# Altium footprint library PCB1.PcbLib: 34 footprints (part 2 of 3)
Each footprint in its own frame and in the unit in brackets; x right, y up, seen from the top. Pads: shape width x height; smd on the part's side, far side on the other; paste and mask are expansions set on the pad; w line width, h text height; cw(c..) or ccw(c..) is an arc to the next point about the centre after c.
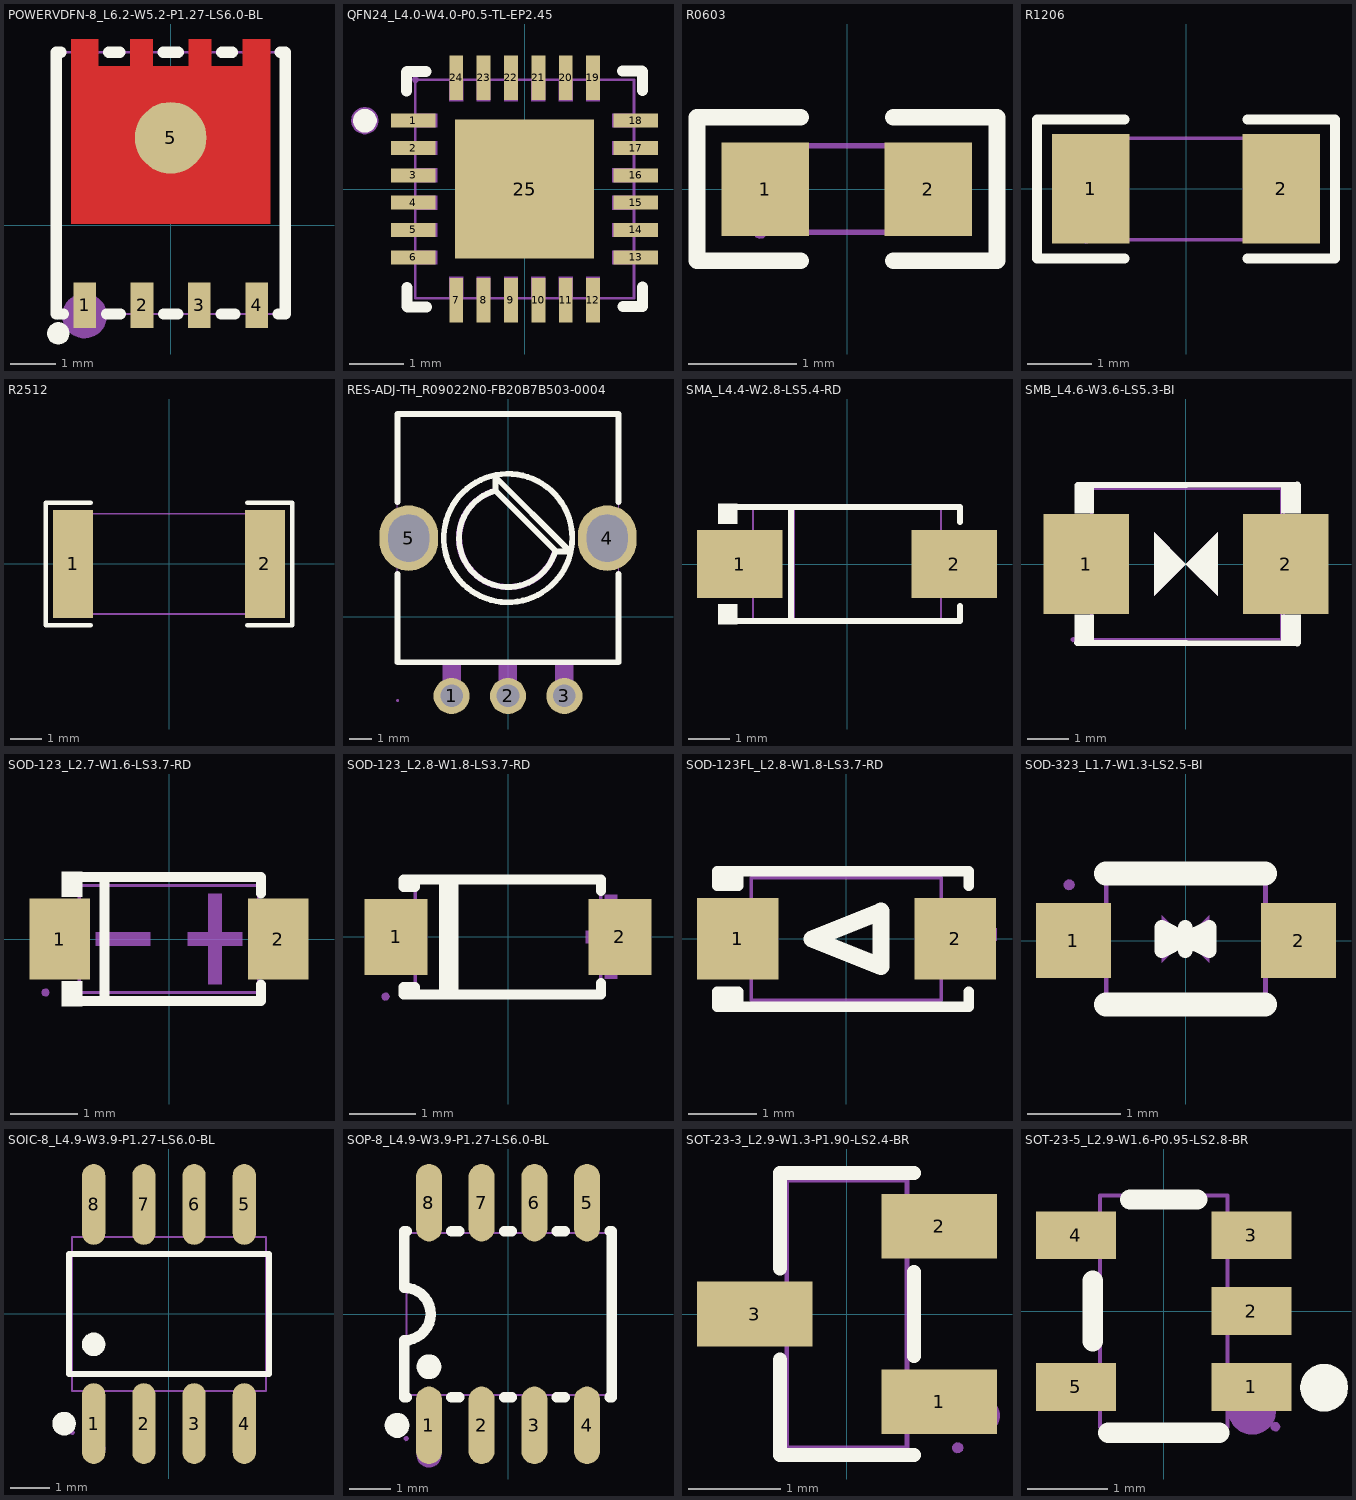
[diagram p1: the footprints below, top view; thin cyan lines are the x and y axes]

## POWERVDFN-8_L6.2-W5.2-P1.27-LS6.0-BL [mil]
pads (5):
  rect 19.7x39.4 smd paste-3937 mask+2: 1(-75,-69.9) 2(-25,-69.9) 3(25,-69.9) 4(75,-69.9)
  round 62.5 smd: 5(0,76.2)
Top Layer:
  region: -86.6,1 -86.6,162.4 -63,162.4 -63,138.8 -35.4,138.8 -35.4,162.4 -15.7,162.4 -15.7,138.8 15.8,138.8 15.8,162.4 35.5,162.4 35.5,138.8 63,138.8 63,162.4 86.7,162.4 86.7,1
Top Overlay:
  lines w9.8: -102.9,-94.5 -102.5,-92.6 -101.5,-91 -99.9,-90 -98,-89.6 -96.1,-90 -94.5,-91 -93.4,-92.6 -93.1,-94.5 -93.4,-96.4 -94.5,-98 -96.1,-99 -98,-99.4 -99.9,-99 -101.5,-98 -102.5,-96.4 -102.9,-94.5
  lines w10: -95.7,150.8 -100,150.8 -100,136.4 -100,-63.6 -100,-77.6 -93.9,-77.6 ; -56,-77.6 -43.9,-77.6 ; -53.9,150.8 -44.5,150.8 ; -6.6,150.8 6.7,150.8 ; -6,-77.6 6.1,-77.6 ; 44,-77.6 56.1,-77.6 ; 44.6,150.8 53.9,150.8 ; 94,-77.6 100,-77.6 100,-63.6 100,136.4 100,150.8 95.8,150.8
Top Paste:
  region: 86.7,162.4 63,162.4 63,138.8 35.5,138.8 35.5,162.4 15.8,162.4 15.8,138.8 -15.7,138.8 -15.7,162.4 -35.4,162.4 -35.4,138.8 -63,138.8 -63,162.4 -86.6,162.4 -86.6,1 86.7,1 86.7,1.4
  region: -84.8,-89.6 -84.8,-50.2 -65.1,-50.2 -65.1,-89.6
  region: -34.8,-89.6 -34.8,-50.2 -15.1,-50.2 -15.1,-89.6
  region: 15.2,-89.6 15.2,-50.2 34.9,-50.2 34.9,-89.6
  region: 65.2,-89.6 65.2,-50.2 84.9,-50.2 84.9,-89.6
Mechanical 6:
  lines w19.7: -84.9,-80.5 -84.9,-77.8 -84.2,-75.2 -82.8,-72.9 -80.8,-71.1 -78.5,-69.9 -75.8,-69.3 -73.2,-69.5 -70.6,-70.4 -68.4,-72 -66.8,-74 -65.7,-76.5 -65.3,-79.1 -65.7,-81.8 -66.8,-84.3 -68.4,-86.3 -70.6,-87.9 -73.2,-88.8 -75.8,-89 -78.5,-88.4 -80.8,-87.2 -82.8,-85.4 -84.2,-83.1 -84.9,-80.5
Mechanical 7:
  lines w2: -98.4,-77.6 -98.4,150.8 98.5,150.8 98.5,-77.6 -98.4,-77.6
Mechanical 8:
  region: -96,-79.7 -96.4,-81 -97.4,-81.9 -98.7,-82.1 -99.9,-81.5 -100.7,-80.4 -100.7,-79.1 -99.9,-78 -98.7,-77.4 -97.4,-77.6 -96.4,-78.5
Mechanical 9:
  region: -82.9,153.5 -67.5,153.5 -67.6,133.7 -33.3,133.7 -33,153.4 -17.4,153.5 -17.3,133.8 16.7,133.9 16.9,153.4 32.6,153.3 32.5,133.8 66.9,133.8 66.9,153.4 82.5,153.5 82.7,133.7 82.9,8.8 -82.6,8.8 -83.9,153.5 -83.8,153.5
  region: 67.2,-79.7 67.2,-60.1 82.9,-60.1 82.9,-79.7
  region: 17.2,-79.7 17.2,-60.1 32.9,-60.1 32.9,-79.7
  region: -32.8,-79.7 -32.8,-60.1 -17.1,-60.1 -17.1,-79.7
  region: -82.8,-79.7 -82.8,-60.1 -67.1,-60.1 -67.1,-79.7

## QFN24_L4.0-W4.0-P0.5-TL-EP2.45 [mil]
pads (25):
  rect 32x10 smd paste+0 mask+2: 1(-80,49.2) 2(-80,29.5) 3(-80,9.8) 4(-80,-9.8) 5(-80,-29.5) 6(-80,-49.2) 13(80,-49.2) 14(80,-29.5) 15(80,-9.8) 16(80,9.8) 17(80,29.5) 18(80,49.2)
  rect 10x32 smd paste+0 mask+2: 7(-49.2,-80) 8(-29.5,-80) 9(-9.8,-80) 10(9.9,-80) 11(29.6,-80) 12(49.2,-80) 19(49.2,80) 20(29.6,80) 21(9.9,80) 22(-9.8,80) 23(-29.5,80) 24(-49.2,80)
  rect 100x100 smd paste+0 mask+2: 25(0,0)
Top Overlay:
  lines w7.9: -85,70.5 -85,84.3 ; -84.6,-84.7 -84.6,-70.9 ; -84.6,84.6 -70.8,84.6 ; -84.3,-85 -70.5,-85 ; 70.5,85 84.3,85 ; 70.9,-84.7 84.7,-84.7 ; 84.7,70.9 84.7,84.6 ; 85,-84.3 85,-70.5
  lines w10: -118.5,49.2 -118.2,50.7 -117.2,52 -115.8,52.7 -114.2,52.7 -112.8,52 -111.8,50.7 -111.4,49.2 -111.8,47.7 -112.8,46.4 -114.2,45.8 -115.8,45.8 -117.2,46.4 -118.2,47.7 -118.5,49.2
Mechanical 6:
  lines w9.8: -119.9,49.2 -119.5,51.1 -118.5,52.7 -116.9,53.7 -115,54.1 -113.1,53.7 -111.5,52.7 -110.4,51.1 -110.1,49.2 -110.4,47.3 -111.5,45.7 -113.1,44.7 -115,44.3 -116.9,44.7 -118.5,45.7 -119.5,47.3 -119.9,49.2
Mechanical 7:
  lines w2: -78.7,-78.7 78.8,-78.7 78.8,78.7 -78.7,78.7 -78.7,-78.7
Mechanical 8:
  region: -76.4,78.7 -76.7,77.5 -77.7,76.6 -79.1,76.4 -80.3,77 -81,78.1 -81,79.4 -80.3,80.5 -79.1,81.1 -77.7,80.9 -76.7,80
Mechanical 9:
  region: -48.2,-48.2 -48.2,48.2 48.3,48.2 48.3,-48.2
  region: -54.1,63 -54.1,78.7 -44.3,78.7 -44.3,63
  region: -34.4,63 -34.4,78.7 -24.6,78.7 -24.6,63
  region: -14.7,63 -14.7,78.7 -4.9,78.7 -4.9,63
  region: 4.9,63 4.9,78.7 14.8,78.7 14.8,63
  region: 24.6,63 24.6,78.7 34.5,78.7 34.5,63
  region: 44.3,63 44.3,78.7 54.2,78.7 54.2,63
  region: 63,44.3 63,54.1 78.8,54.1 78.8,44.3
  region: 63,24.6 63,34.4 78.8,34.4 78.8,24.6
  region: 63,4.9 63,14.8 78.8,14.8 78.8,4.9
  region: 63,-14.8 63,-4.9 78.8,-4.9 78.8,-14.8
  region: 63,-34.5 63,-24.6 78.8,-24.6 78.8,-34.5
  region: 63,-54.1 63,-44.3 78.8,-44.3 78.8,-54.1
  region: 44.3,-78.7 44.3,-63 54.2,-63 54.2,-78.7
  region: 24.6,-78.7 24.6,-63 34.5,-63 34.5,-78.7
  region: 4.9,-78.7 4.9,-63 14.8,-63 14.8,-78.7
  region: -14.7,-78.7 -14.7,-63 -4.9,-63 -4.9,-78.7
  region: -34.4,-78.7 -34.4,-63 -24.6,-63 -24.6,-78.7
  region: -54.1,-78.7 -54.1,-63 -44.3,-63 -44.3,-78.7
  region: -78.7,-54.1 -78.7,-44.3 -63,-44.3 -63,-54.1
  region: -78.7,-34.5 -78.7,-24.6 -63,-24.6 -63,-34.5
  region: -78.7,-14.8 -78.7,-4.9 -63,-4.9 -63,-14.8
  region: -78.7,4.9 -78.7,14.8 -63,14.8 -63,4.9
  region: -78.7,24.6 -78.7,34.4 -63,34.4 -63,24.6
  region: -78.7,44.3 -78.7,54.1 -63,54.1 -63,44.3

## R0603 [mil]
pads (2):
  rect 31.8x34 smd paste-3937 mask+2: 1(-29.7,0) 2(29.6,0)
Top Overlay:
  lines w6: -16.8,-26 -54.5,-26 -54.5,26.1 -16.8,26.1 ; 16.8,-26 54.5,-26 54.5,26.1 16.8,26.1
Top Paste:
  region: -14,15.8 -14,6.8 -29,6.8 -29,-6.2 -14,-6.2 -14,-15.7 -16,-17.7 -47.1,-17.7 -49,-15.7 -49,15.8 -47.1,17.8 -16,17.8
  region: 47,17.8 15.5,17.8 13.6,15.8 13.6,6.8 28.1,6.8 28.1,-6.2 13.6,-6.2 13.6,-15.7 15.5,-17.7 47,-17.7 49,-15.7 49,15.8
Mechanical 7:
  lines w2: -31.5,-15.7 31.5,-15.7 31.5,15.8 -31.5,15.8 -31.5,-15.7
Mechanical 8:
  region: -29.2,-15.7 -29.5,-17 -30.5,-17.8 -31.9,-18 -33.1,-17.5 -33.8,-16.4 -33.8,-15 -33.1,-13.9 -31.9,-13.4 -30.5,-13.6 -29.5,-14.4
Mechanical 9:
  region: 31.5,-15.7 31.5,15.8 19.7,15.8 19.7,-15.7
  region: -31.5,-15.7 -31.5,15.8 -19.7,15.8 -19.7,-15.7

## R1206 [mil]
pads (2):
  rect 47.5x67 smd paste-3937 mask+2: 1(-58.2,0) 2(58.2,0)
Top Overlay:
  lines w6: -37.4,-42.5 -91,-42.5 -91,42.4 -37.4,42.4 ; 37.5,-42.5 91,-42.5 91,42.4 37.5,42.4
Top Paste:
  region: -34.4,-29.6 -34.4,-15.4 -38.4,-11.4 -46.6,-11.4 -50.6,-7.5 -50.6,7.4 -46.6,11.3 -38.4,11.3 -34.4,15.3 -34.4,29.5 -38.4,33.4 -78,33.4 -82,29.5 -82,-29.6 -78,-33.5 -38.4,-33.5
  region: 34.5,-29.6 34.5,-15.4 38.4,-11.4 46.7,-11.4 50.6,-7.5 50.6,7.4 46.7,11.3 38.4,11.3 34.5,15.3 34.5,29.5 38.4,33.4 78.1,33.4 82,29.5 82,-29.6 78.1,-33.5 38.4,-33.5
Mechanical 7:
  lines w2: -61,-31 61.1,-31 61.1,31 -61,31 -61,-31
Mechanical 8:
  region: -58.6,-31 -59,-32.3 -60,-33.2 -61.3,-33.4 -62.5,-32.8 -63.3,-31.7 -63.3,-30.4 -62.5,-29.3 -61.3,-28.7 -60,-28.9 -59,-29.8
Mechanical 9:
  region: 61.1,-31 61.1,31 43.3,31 43.3,-31
  region: -61,-31 -61,31 -43.3,31 -43.3,-31

## R2512 [mil]
pads (2):
  rect 50.5x136.1 smd paste-3937 mask+2: 1(-120.7,0) 2(120.7,0)
Top Overlay:
  lines w6: -98.5,-77.1 -155,-77.1 -155,77 -98.5,77 ; 98.5,-77.1 155,-77.1 155,77 98.5,77
Top Paste:
  region: -95.5,-64.1 -95.5,-27.1 -99.4,-23.2 -108.7,-23.2 -112.7,-19.2 -112.7,19.2 -108.7,23.1 -99.4,23.1 -95.5,27 -95.5,64.1 -99.4,68 -142,68 -146,64.1 -146,-64.1 -142,-68.1 -99.4,-68.1
  region: 95.5,-64.1 95.5,-27.1 99.4,-23.2 108.7,-23.2 112.6,-19.2 112.6,19.2 108.7,23.1 99.4,23.1 95.5,27 95.5,64.1 99.4,68 142,68 146,64.1 146,-64.1 142,-68.1 99.4,-68.1
Mechanical 7:
  lines w2: -124,-63 124,-63 124,63 -124,63 -124,-63
Mechanical 8:
  region: -122.7,-63 -123,-64.3 -124,-65.2 -125.3,-65.4 -126.6,-64.8 -127.3,-63.7 -127.3,-62.4 -126.6,-61.2 -125.3,-60.7 -124,-60.9 -123,-61.7
Mechanical 9:
  region: 100.4,-63 100.4,63 124,63 124,-63
  region: -124,-63 -124,63 -100.4,63 -100.4,-63

## RES-ADJ-TH_R09022N0-FB20B7B503-0004 [mil]
pads (5):
  round 63 hole 39.4: 1(-98.4,-137.8) 2(0,-137.8) 3(98.4,-137.8)
  oval 102.4x114.2 hole 70.9 slot 82.7 at 90 deg: 4(173.2,137.8) 5(-173.2,137.8)
Top Overlay:
  lines w10: -192.9,74.9 -192.9,-78.8 192.9,-78.8 192.9,74.9 ; -192.9,200.6 -192.9,354.3 192.9,354.3 192.9,200.6 ; -21.7,220.4 -29.4,218 -36.9,214.9 -44,211 -50.8,206.5 -57.1,201.4 -62.8,195.7 -68.1,189.5 -72.7,182.8 -76.6,175.7 -79.8,168.3 -82.4,160.6 -84.2,152.7 -85.2,144.6 -85.5,136.5 -85,128.4 -83.7,120.4 -81.7,112.5 -78.9,104.9 -75.4,97.6 -71.3,90.6 -66.5,84.1 -61.1,78 -55.2,72.5 -48.7,67.5 -41.9,63.2 -34.6,59.6 -27,56.7 -19.2,54.5 -11.2,53 -3.2,52.4 4.9,52.4 13,53.3 21,54.9 28.7,57.3 36.2,60.4 43.4,64.1 50.2,68.6 56.5,73.7 62.3,79.3 67.6,85.5 72.2,92.1 76.3,99.2 79.6,106.6 82.2,114.3 ; -21.7,220.4 82.2,116.6 82.2,114.3 ; -21.7,220.4 -21.7,244.1 104.3,118.1 104.3,114.3 82.2,114.3 ; -112,133.1 -112,142.5 -111.2,151.8 -109.6,161.1 -107.3,170.2 -104.2,179 -100.4,187.6 -95.9,195.8 -90.7,203.6 -84.9,211 -78.4,217.8 -71.5,224.1 -64,229.8 -56.1,234.8 -47.7,239.2 -39.1,242.8 -30.2,245.7 -21,247.9 -11.7,249.2 -2.4,249.8 7,249.6 16.4,248.6 25.6,246.9 34.6,244.4 43.4,241.1 51.9,237.1 60,232.4 67.7,227 75,221.1 81.7,214.5 87.8,207.4 93.3,199.8 98.2,191.8 102.4,183.3 105.8,174.6 108.5,165.6 110.5,156.5 111.7,147.1 112.1,137.8 111.7,128.4 110.5,119.1 108.5,109.9 105.8,100.9 102.4,92.2 98.2,83.8 93.3,75.7 87.8,68.1 81.7,61 75,54.5 67.7,48.5 60,43.1 51.9,38.4 43.4,34.4 34.6,31.2 25.6,28.6 16.4,26.9 7,25.9 -2.4,25.7 -11.7,26.3 -21,27.7 -30.2,29.8 -39.1,32.7 -47.7,36.3 -56.1,40.7 -64,45.7 -71.5,51.4 -78.4,57.7 -84.9,64.5 -90.7,71.9 -95.9,79.7 -100.4,87.9 -104.2,96.5 -107.3,105.4 -109.6,114.5 -111.2,123.7 -112,133.1
Mechanical 6:
  region: -20.4,215.6 -28,213.2 -35.4,210 -42.4,206.2 -49,201.6 -55.1,196.4 -60.6,190.7 -65.6,184.4 -69.9,177.7 -73.5,170.5 -76.4,163.1 -78.5,155.3 -79.9,147.5 -80.4,139.5 -80.2,131.5 -79.2,123.5 -77.4,115.7 -74.8,108.2 -71.5,100.9 -67.5,94 -62.8,87.5 -57.5,81.5 -51.7,76.1 -45.3,71.2 -38.4,67.1 -31.2,63.6 -23.7,60.9 -16,58.9 -8,57.7 -0.1,57.3 7.9,57.7 15.9,58.9 23.6,60.8 31.1,63.5 38.3,67 45.2,71.2 51.6,76 57.4,81.4 62.8,87.4 67.5,93.9 71.5,100.8 74.8,108.1 77.4,115.6 78.3,117.4 79.7,118.6 81.6,119.2 83.5,119.1 85.3,118.2 86.5,116.7 87.1,114.8 87,112.9 84.3,104.9 80.9,97.3 76.8,89.9 72,83 66.7,76.6 60.7,70.7 54.2,65.3 47.3,60.6 39.9,56.6 32.2,53.2 24.2,50.6 16.1,48.7 7.7,47.6 -0.7,47.3 -9,47.7 -17.3,49 -25.5,51 -33.4,53.7 -41.1,57.2 -48.4,61.3 -55.3,66.1 -61.7,71.6 -67.5,77.6 -72.8,84.1 -77.5,91.1 -81.5,98.5 -84.8,106.2 -87.3,114.2 -89.1,122.4 -90.2,130.7 -90.5,139.1 -89.9,147.5 -88.7,155.8 -86.6,163.9 -83.8,171.8 -80.3,179.4 -76.1,186.7 -71.2,193.6 -65.7,199.9 -59.7,205.7 -53.1,211 -46.1,215.6 -38.7,219.5 -30.9,222.8 -22.9,225.3 -21,225.4 -19.1,224.7 -17.7,223.4 -16.8,221.7 -16.7,219.7 -17.3,217.9 -18.6,216.4 -20.4,215.6
Mechanical 7:
  lines w2: -192.9,-78.8 192.9,-78.8 192.9,354.3 -192.9,354.3 -192.9,-78.8
Mechanical 8:
  region: -190.6,-145.7 -190.9,-147 -191.9,-147.9 -193.3,-148 -194.5,-147.5 -195.2,-146.4 -195.2,-145 -194.5,-143.9 -193.3,-143.4 -191.9,-143.6 -190.9,-144.4
Mechanical 9:
  region: -181.1,177.1 -165.4,177.1 -165.4,98.4 -181.1,98.4
  region: 165.3,177.1 181.1,177.1 181.1,98.4 165.3,98.4
  region: -114.2,-130 -82.7,-130 -82.7,-145.7 -114.2,-145.7
  region: -15.8,-130 15.7,-130 15.7,-145.7 -15.8,-145.7
  region: 82.7,-130 114.2,-130 114.2,-145.7 82.7,-145.7
Mechanical 10:
  region: -114.2,-145.7 -82.7,-145.7 -82.7,-76.8 -114.2,-76.8
  region: 82.7,-145.7 114.2,-145.7 114.2,-76.8 82.7,-76.8
  region: -15.8,-145.7 15.7,-145.7 15.7,-76.8 -15.8,-76.8

## SMA_L4.4-W2.8-LS5.4-RD [mil]
pads (2):
  rect 80.6x63.8 smd: 1(-101,0) 2(101,0)
Top Overlay:
  region: -103.3,-56.7 -103.3,-37.9 -121.3,-37.9 -121.3,-56.7
  region: -103.3,56.7 -103.3,37.9 -121.3,37.9 -121.3,56.7
  lines w6: -106.3,-53.7 106.4,-53.7 106.4,-39.9 ; -106.3,53.7 106.4,53.7 106.4,39.9 ; -52.7,-53.7 -52.7,53.7
Mechanical 6:
  region: -55.1,-51.2 -49.2,-51.2 -49.2,51.1 -55.1,51.1
  region: 84.4,-25.4 84.4,25.3 76.8,25.3 76.8,-25.4
  region: 95.8,-3.8 95.8,3.8 65.4,3.8 65.4,-3.8
  region: -95.7,-3.8 -95.7,3.8 -65.3,3.8 -65.3,-3.8
Mechanical 7:
  lines w2: -88.6,-54.2 88.6,-54.2 88.6,54.1 -88.6,54.1 -88.6,-54.2
Mechanical 8:
  region: -107.9,-54.2 -108.2,-55.4 -109.2,-56.3 -110.6,-56.5 -111.8,-56 -112.5,-54.8 -112.5,-53.5 -111.8,-52.4 -110.6,-51.8 -109.2,-52 -108.2,-52.9
Mechanical 9:
  region: 110.6,28.5 110.6,-28.6 65.3,-28.6 65.3,28.5
  region: -110.2,-28.6 -110.2,28.5 -64.9,28.5 -64.9,-28.6

## SMB_L4.6-W3.6-LS5.3-BI [mil]
pads (2):
  rect 80.6x94.5 smd: 1(-94.1,0) 2(94.2,0)
Top Overlay:
  region: -30,-30 -30,30 0,0
  region: 30,-30 0,0 30,30
  region: -105,-75 -105,-47.8 -87,-47.8 -87,-75
  region: -105,75 -105,47.9 -87,47.9 -87,75
  region: 90,75 90,47.9 108,47.9 108,75
  region: 90,-75 90,-47.8 108,-47.8 108,-75
  lines w6: -102.3,-74.4 105,-75 ; -102,74.3 104.9,75
Mechanical 6:
  region: -30,-30 -30,30 0,0
  region: 30,-30 0,0 30,30
Mechanical 7:
  lines w2: -89.5,-70.8 -89.5,70.9 89.6,70.9 89.6,-70.8 -89.5,-70.8 ; -88.5,-71.2 -88.5,71.3 92.6,71.3 92.6,-71.2 -88.5,-71.2
Mechanical 8:
  region: -103.9,-71.2 -104.3,-72.5 -105.3,-73.4 -106.6,-73.6 -107.8,-73 -108.5,-71.9 -108.5,-70.6 -107.8,-69.5 -106.6,-68.9 -105.3,-69.1 -104.3,-70
Mechanical 9:
  region: -106.3,40.4 -106.3,-40.3 -61.7,-40.3 -61.7,40.4
  region: 106.3,40.4 106.3,-40.3 61.7,-40.3 61.7,40.4

## SOD-123_L2.7-W1.6-LS3.7-RD [mil]
pads (2):
  rect 35.8x48 smd: 1(-64.4,0) 2(64.4,0)
Top Overlay:
  region: -51.2,-39.5 -51.2,-24.9 -63.2,-24.9 -63.2,-39.5
  region: -51.2,39.5 -51.2,24.9 -63.2,24.9 -63.2,39.5
  lines w6: -54.2,-36.5 54.2,-36.5 54.2,-26.9 ; -54.2,36.5 54.2,36.5 54.2,26.9 ; -38,-36.5 -38,36.5
Mechanical 6:
  region: 31.1,26.8 31.1,-26.8 23.1,-26.8 23.1,26.8
  region: 43.2,4 43.2,-4 11,-4 11,4
  region: -43.1,4 -43.1,-4 -11,-4 -11,4
Mechanical 7:
  lines w2: -52.9,-31.5 53,-31.5 53,31.5 -52.9,31.5 -52.9,-31.5
Mechanical 8:
  region: -70.5,-31.5 -70.8,-32.8 -71.8,-33.7 -73.2,-33.8 -74.4,-33.3 -75.1,-32.2 -75.1,-30.8 -74.4,-29.7 -73.2,-29.2 -71.8,-29.4 -70.8,-30.2
Mechanical 9:
  region: 62.8,11.8 72.7,11.8 72.7,-11.8 62.8,-11.8
  region: -72.6,11.8 -62.8,11.8 -62.8,-11.8 -72.6,-11.8
Mechanical 10:
  region: -71.2,-11.8 -52.3,-11.8 -52.3,11.8 -71.2,11.8
  region: 71.3,11.8 52.4,11.8 52.4,-11.8 71.3,-11.8

## SOD-123_L2.8-W1.8-LS3.7-RD [mil]
pads (2):
  rect 37.4x45.3 smd: 1(-66.6,0) 2(66.6,0)
Top Overlay:
  lines w6: -38.2,-34.1 -38.2,34.1 ; -32.6,-34.1 -32.6,34.1 ; 55.3,-27.5 55.3,-34.1 -55.4,-34.1 ; 55.3,27.4 55.3,34.1 -55.4,34.1 ; -55.4,-34.1 -55.4,-29.8 -62.2,-29.8 -62.2,-34.1 -55.4,-34.1 ; -55.4,34.1 -55.4,29.7 -62.2,29.7 -62.2,34.1 -55.4,34.1
Mechanical 6:
  region: 65,25 65,-24.8 57.5,-24.8 57.5,25
  region: 76.2,3.8 76.2,-3.7 46.3,-3.7 46.3,3.8
  region: -79.9,3.7 -79.9,-3.8 -50.1,-3.8 -50.1,3.7
Mechanical 7:
  lines w2: -55.1,-35.5 55.1,-35.5 55.1,35.4 -55.1,35.4 -55.1,-35.5
Mechanical 8:
  region: -70.5,-35.5 -70.9,-36.8 -71.9,-37.6 -73.2,-37.8 -74.4,-37.3 -75.1,-36.1 -75.1,-34.8 -74.4,-33.7 -73.2,-33.1 -71.9,-33.3 -70.9,-34.2
Mechanical 9:
  region: 72.8,-18.4 72.8,18.3 51.2,18.3 51.2,-18.4
  region: -72.9,-18.4 -72.9,18.3 -51.2,18.3 -51.2,-18.4

## SOD-123FL_L2.8-W1.8-LS3.7-RD [mil]
pads (2):
  rect 47.2x47.2 smd: 1(-63,0) 2(63,0)
Top Overlay:
  lines w6: -70.5,-39.4 -70.5,-30.7 ; -70.5,30.7 -70.5,39.3 ; -66.6,-39.4 -66.6,-30.7 ; -66.6,30.7 -66.6,39.3 ; -62.6,-39.4 -62.6,-30.7 -74.8,-30.7 -74.8,-39.4 63,-39.4 70.9,-39.4 70.9,-30.7 ; -62.6,39.3 -62.6,30.7 -74.8,30.7 -74.8,39.3 55.1,39.3 ; 47.3,39.3 70.9,39.3 70.9,30.7
  lines w10: -20,0 20,-16 20,16 -20,0
Mechanical 6:
  region: 65.2,-17.2 65.2,17.4 72.3,17.4 72.3,-17.2
  region: 87.3,-1 52.6,-1 52.6,6.1 87.3,6.1
  region: -51.7,-3.7 -86.4,-3.7 -86.4,3.4 -51.7,3.4
Mechanical 7:
  lines w2: -55.1,-35.5 55.1,-35.5 55.1,35.4 -55.1,35.4 -55.1,-35.5
Mechanical 8:
  region: -70.5,-35.5 -70.8,-36.7 -71.8,-37.6 -73.2,-37.8 -74.4,-37.2 -75.1,-36.1 -75.1,-34.8 -74.4,-33.7 -73.2,-33.1 -71.8,-33.3 -70.8,-34.2
Mechanical 9:
  region: -72.8,18.7 -41.3,18.7 -41.3,-18.7 -72.8,-18.7
  region: 41.4,18.7 72.9,18.7 72.9,-18.7 41.4,-18.7

## SOD-323_L1.7-W1.3-LS2.5-BI [mil]
pads (2):
  rect 31.5x31.5 smd: 1(-47.4,0) 2(47.5,0)
Top Overlay:
  lines w6.1: -5.2,0.6 -0.1,0.6 9.8,5.6 9.8,-4.4 -0.1,0.5 ; -0.3,0.7 -10.2,5.6 -10.2,-4.4 -0.3,0.6 4.8,0.6 ; -0.2,-4.4 -0.2,5.6
  lines w10: -33.7,-26.9 33.3,-26.9 ; -33.7,28.2 33.3,28.2
Mechanical 6:
  region: -10.2,10.6 -10.2,-9.4 -0.2,0.6
  region: 9.8,-9.4 9.8,10.6 -0.2,0.6
Mechanical 7:
  lines w2: -33.5,-24.6 -33.5,24.6 33.5,24.6 33.5,-24.6 -33.5,-24.6
Mechanical 8:
  region: -46.8,23.5 -47.2,22.2 -48.2,21.3 -49.5,21.1 -50.7,21.7 -51.5,22.8 -51.5,24.1 -50.7,25.2 -49.5,25.8 -48.2,25.6 -47.2,24.7
Mechanical 9:
  region: 37.2,-6.4 37.2,6.4 49.2,6.4 49.2,-6.4
  region: -49.2,-6.4 -49.2,6.4 -37.6,6.4 -37.6,-6.4
Mechanical 10:
  region: 32.9,-6.4 32.9,6.4 37.6,6.4 37.6,-6.4
  region: -38,-6.4 -38,6.4 -33.3,6.4 -33.3,-6.4

## SOIC-8_L4.9-W3.9-P1.27-LS6.0-BL [mil]
pads (8):
  oval 23.1x80.5 smd: 1(-75,-109.2) 2(-25,-109.2) 3(25,-109.2) 4(75,-109.2) 5(75,109.1) 6(25,109.1) 7(-25,109.1) 8(-75,109.1)
Top Overlay:
  lines w6: -99.5,-59.9 99.4,-59.9 99.4,59.9 -99.5,59.9 -99.5,-59.9
  lines w11.8: -110.3,-109.2 -110,-107.2 -108.9,-105.4 -107.4,-104.1 -105.4,-103.4 -103.4,-103.4 -101.4,-104.1 -99.9,-105.4 -98.8,-107.2 -98.5,-109.2 -98.8,-111.2 -99.9,-113 -101.4,-114.3 -103.4,-115 -105.4,-115 -107.4,-114.3 -108.9,-113 -110,-111.2 -110.3,-109.2 ; -80.9,-30.3 -80.6,-28.3 -79.5,-26.5 -78,-25.2 -76,-24.5 -74,-24.5 -72.1,-25.2 -70.5,-26.5 -69.5,-28.3 -69.1,-30.3 -69.5,-32.3 -70.5,-34.1 -72.1,-35.4 -74,-36.1 -76,-36.1 -78,-35.4 -79.5,-34.1 -80.6,-32.3 -80.9,-30.3
Mechanical 6:
  lines w11.8: -80.9,-133.9 -80.6,-131.9 -79.5,-130.1 -78,-128.8 -76,-128.1 -74,-128.1 -72.1,-128.8 -70.5,-130.1 -69.5,-131.9 -69.1,-133.9 -69.5,-135.9 -70.5,-137.7 -72.1,-139 -74,-139.7 -76,-139.7 -78,-139 -79.5,-137.7 -80.6,-135.9 -80.9,-133.9
Mechanical 7:
  lines w2: -96.5,-76.8 96.4,-76.8 96.4,76.7 -96.5,76.7 -96.5,-76.8
Mechanical 8:
  region: -94.1,-118.1 -94.5,-119.4 -95.5,-120.3 -96.8,-120.5 -98,-119.9 -98.7,-118.8 -98.7,-117.5 -98,-116.4 -96.8,-115.8 -95.5,-116 -94.5,-116.9
Mechanical 9:
  region: 66.7,118.1 66.7,85.2 83.3,85.2 83.3,118.1
  region: 16.7,118.1 16.7,85.2 33.3,85.2 33.3,118.1
  region: -33.3,118.1 -33.3,85.2 -16.7,85.2 -16.7,118.1
  region: -83.3,118.1 -83.3,85.2 -66.7,85.2 -66.7,118.1
  region: 66.7,-118.1 66.7,-85.3 83.3,-85.3 83.3,-118.1
  region: 16.7,-118.1 16.7,-85.3 33.3,-85.3 33.3,-118.1
  region: -33.3,-118.1 -33.3,-85.3 -16.7,-85.3 -16.7,-118.1
  region: -83.3,-118.1 -83.3,-85.3 -66.7,-85.3 -66.7,-118.1
Mechanical 10:
  region: 66.7,85.6 66.7,76.4 83.3,76.4 83.3,85.6
  region: 16.7,85.6 16.7,76.4 33.3,76.4 33.3,85.6
  region: -33.3,85.6 -33.3,76.4 -16.7,76.4 -16.7,85.6
  region: -83.3,85.6 -83.3,76.4 -66.7,76.4 -66.7,85.6
  region: 66.7,-85.7 66.7,-76.4 83.3,-76.4 83.3,-85.7
  region: 16.7,-85.7 16.7,-76.4 33.3,-76.4 33.3,-85.7
  region: -33.3,-85.7 -33.3,-76.4 -16.7,-76.4 -16.7,-85.7
  region: -83.3,-85.7 -83.3,-76.4 -66.7,-76.4 -66.7,-85.7

## SOP-8_L4.9-W3.9-P1.27-LS6.0-BL [mil]
pads (8):
  oval 24.8x73.4 smd: 1(-75,-105.6) 2(-25,-105.6) 3(25,-105.6) 4(75,-105.6) 5(75,105.6) 6(25,105.6) 7(-25,105.6) 8(-75,105.6)
Top Overlay:
  lines w10: -96.3,-78.8 -98.4,-78.8 -98.4,-25 -94.1,-24.7 -89.9,-23.5 -85.9,-21.7 -82.3,-19.2 -79.3,-16.1 -76.8,-12.6 -74.9,-8.6 -73.8,-4.4 -73.4,-0.1 -73.8,4.3 -74.9,8.5 -76.7,12.4 -79.2,16 -82.3,19.1 -85.9,21.6 -89.8,23.4 -94,24.6 -98.4,25 -98.4,78.7 -96.3,78.7 ; -53.6,-78.8 -46.3,-78.8 ; -53.6,78.7 -46.3,78.7 ; -3.6,-78.8 3.7,-78.8 ; -3.6,78.7 3.7,78.7 ; 46.4,-78.8 53.7,-78.8 ; 46.4,78.7 53.7,78.7 ; 96.4,78.7 98.4,78.7 98.4,-76.7 96.4,-78.8 98.4,-78.8
  lines w11.8: -111.1,-105.6 -110.7,-103.6 -109.7,-101.9 -108.1,-100.5 -106.2,-99.8 -104.2,-99.8 -102.2,-100.5 -100.7,-101.9 -99.6,-103.6 -99.3,-105.6 -99.6,-107.7 -100.7,-109.4 -102.2,-110.8 -104.2,-111.5 -106.2,-111.5 -108.1,-110.8 -109.7,-109.4 -110.7,-107.7 -111.1,-105.6 ; -80.9,-50 -80.5,-48 -79.5,-46.2 -77.9,-44.9 -76,-44.2 -74,-44.2 -72,-44.9 -70.5,-46.2 -69.4,-48 -69.1,-50 -69.4,-52.1 -70.5,-53.8 -72,-55.2 -74,-55.9 -76,-55.9 -77.9,-55.2 -79.5,-53.8 -80.5,-52.1 -80.9,-50
Mechanical 6:
  lines w11.8: -80.9,-133.9 -80.5,-131.9 -79.5,-130.1 -77.9,-128.8 -76,-128.1 -74,-128.1 -72,-128.8 -70.5,-130.1 -69.4,-131.9 -69.1,-133.9 -69.4,-135.9 -70.5,-137.7 -72,-139 -74,-139.7 -76,-139.7 -77.9,-139 -79.5,-137.7 -80.5,-135.9 -80.9,-133.9
Mechanical 7:
  lines w2: -96.4,-76.8 96.5,-76.8 96.5,76.7 -96.4,76.7 -96.4,-76.8
Mechanical 8:
  region: -94.1,-118.1 -94.5,-119.4 -95.5,-120.3 -96.8,-120.5 -98,-119.9 -98.7,-118.8 -98.7,-117.5 -98,-116.4 -96.8,-115.8 -95.5,-116 -94.5,-116.9
Mechanical 9:
  region: -83.3,-118.1 -83.3,-85.3 -66.7,-85.3 -66.7,-118.1
  region: -33.3,-118.1 -33.3,-85.3 -16.7,-85.3 -16.7,-118.1
  region: 16.7,-118.1 16.7,-85.3 33.3,-85.3 33.3,-118.1
  region: 66.7,-118.1 66.7,-85.3 83.3,-85.3 83.3,-118.1
  region: -83.3,85.2 -83.3,118.1 -66.7,118.1 -66.7,85.2
  region: -33.3,85.2 -33.3,118.1 -16.7,118.1 -16.7,85.2
  region: 16.7,85.2 16.7,118.1 33.3,118.1 33.3,85.2
  region: 66.7,85.2 66.7,118.1 83.3,118.1 83.3,85.2
Mechanical 10:
  region: -83.3,-85.7 -83.3,-76.4 -66.7,-76.4 -66.7,-85.7
  region: -33.3,-85.7 -33.3,-76.4 -16.7,-76.4 -16.7,-85.7
  region: 16.7,-85.7 16.7,-76.4 33.3,-76.4 33.3,-85.7
  region: 66.7,-85.7 66.7,-76.4 83.3,-76.4 83.3,-85.7
  region: -83.3,76.3 -83.3,85.6 -66.7,85.6 -66.7,76.3
  region: -33.3,76.3 -33.3,85.6 -16.7,85.6 -16.7,76.3
  region: 16.7,76.3 16.7,85.6 33.3,85.6 33.3,76.3
  region: 66.7,76.3 66.7,85.6 83.3,85.6 83.3,76.3

## SOT-23-3_L2.9-W1.3-P1.90-LS2.4-BR [mil]
pads (3):
  rect 49.2x27.6 smd: 1(39.4,-37.4) 2(39.4,37.4) 3(-39.3,0)
Top Overlay:
  lines w6: -28.6,-19.5 -28.6,-60.1 28.6,-60.1 ; -28.6,19.5 -28.6,60.1 28.6,60.1 ; 28.6,-17.9 28.6,17.9
Mechanical 6:
  lines w7.9: 53.6,-43.3 54,-41.6 55,-40.2 56.6,-39.5 58.4,-39.5 60,-40.2 61,-41.6 61.4,-43.3 61,-45 60,-46.4 58.4,-47.1 56.6,-47.1 55,-46.4 54,-45 53.6,-43.3
Mechanical 7:
  lines w2: -25.6,-57.1 25.6,-57.1 25.6,57.1 -25.6,57.1 -25.6,-57.1
Mechanical 8:
  region: 49.6,-57.1 49.3,-58.4 48.2,-59.2 46.9,-59.4 45.7,-58.9 45,-57.7 45,-56.4 45.7,-55.3 46.9,-54.7 48.2,-54.9 49.3,-55.8
Mechanical 9:
  region: -47.2,-8.5 -47.2,8.5 -35.4,8.5 -35.4,-8.5
  region: 35.5,-45.9 35.5,-28.9 47.3,-28.9 47.3,-45.9
  region: 35.5,28.9 35.5,45.9 47.3,45.9 47.3,28.9
Mechanical 10:
  region: -35.8,-8.5 -35.8,8.5 -25.2,8.5 -25.2,-8.5
  region: 25.2,-45.9 25.2,-28.9 35.8,-28.9 35.8,-45.9
  region: 25.2,28.9 25.2,45.9 35.8,45.9 35.8,28.9

## SOT-23-5_L2.9-W1.6-P0.95-LS2.8-BR [mil]
pads (5):
  rect 39.4x23.6 smd paste+0 mask+2: 1(43.3,-37.4) 2(43.3,0) 3(43.3,37.4) 4(-43.3,37.4) 5(-43.3,-37.4)
Top Overlay:
  lines w10: -35,-15 -35,15 ; -27.5,-60 27.5,-60 ; -16.6,55 16.6,55
  lines w11.8: 73.2,-37.8 73.6,-35.7 74.6,-34 76.2,-32.7 78.1,-31.9 80.2,-31.9 82.1,-32.7 83.7,-34 84.7,-35.7 85,-37.8 84.7,-39.8 83.7,-41.6 82.1,-42.9 80.2,-43.6 78.1,-43.6 76.2,-42.9 74.6,-41.6 73.6,-39.8 73.2,-37.8
Mechanical 6:
  lines w11.8: 37.8,-49.2 38.1,-47.2 39.2,-45.4 40.7,-44.1 42.7,-43.4 44.7,-43.4 46.6,-44.1 48.2,-45.4 49.2,-47.2 49.6,-49.2 49.2,-51.2 48.2,-53 46.6,-54.3 44.7,-55 42.7,-55 40.7,-54.3 39.2,-53 38.1,-51.2 37.8,-49.2
Mechanical 7:
  lines w2: -31.5,-57.1 -31.5,57.1 31.5,57.1 31.5,-57.1 -31.5,-57.1
Mechanical 8:
  region: 57.5,-57.1 57.1,-58.3 56.1,-59.2 54.8,-59.4 53.6,-58.8 52.8,-57.7 52.8,-56.4 53.6,-55.3 54.8,-54.7 56.1,-54.9 57.1,-55.8
Mechanical 9:
  region: 55.1,-7.8 37.4,-7.8 37.4,7.9 55.1,7.9
  region: 55.1,29.6 37.4,29.6 37.4,45.3 55.1,45.3
  region: 55.1,-45.2 37.4,-45.2 37.4,-29.5 55.1,-29.5
  region: -37.4,29.6 -55.1,29.6 -55.1,45.3 -37.4,45.3
  region: -37.4,-45.2 -55.1,-45.2 -55.1,-29.5 -37.4,-29.5
Mechanical 10:
  region: 37.8,-7.8 31.1,-7.8 31.1,7.9 37.8,7.9
  region: 37.8,29.6 31.1,29.6 31.1,45.3 37.8,45.3
  region: 37.8,-45.2 31.1,-45.2 31.1,-29.5 37.8,-29.5
  region: -31.1,29.6 -37.8,29.6 -37.8,45.3 -31.1,45.3
  region: -31.1,-45.2 -37.8,-45.2 -37.8,-29.5 -31.1,-29.5